# EAGLE library part PCF85063A (library madhu)
NXP Tiny Real-Time Clock/calendar with alarm function and I2C-bus
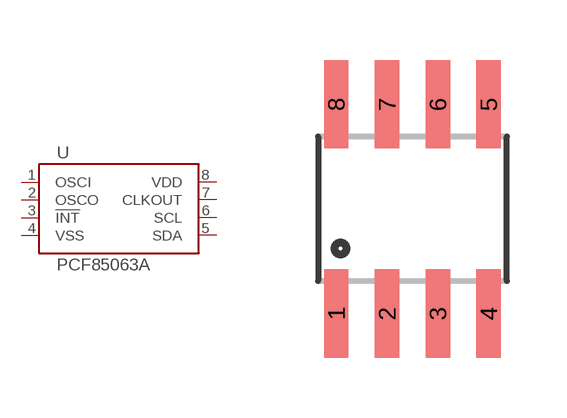
[diagram p29: symbol with the pads of SOIC-8; footprint SOIC-8]

Designator prefix U

## PCF85063AT  [SOIC-8]
1  OSCI  in
2  OSCO  out
3  !INT!  out
4  VSS  pwr
5  SDA  oc
6  SCL  in
7  CLKOUT  out
8  VDD  pwr

## Footprint SOIC-8 (pad centres in mm)
Small Outline Package Fits JEDEC packages (narrow SOIC-8)
smd 0.61 x 2.21: 1 -1.905,-2.616; 2 -0.635,-2.616; 3 0.635,-2.616; 4 1.905,-2.616; 5 1.905,2.616; 6 0.635,2.616; 7 -0.635,2.616; 8 -1.905,2.616